# Altium footprint library Connectors.PcbLib: 113 footprints (part 5 of 8)
Each footprint in its own frame and in the unit in brackets; x right, y up, seen from the top. Pads: shape width x height; smd on the part's side, far side on the other; paste and mask are expansions set on the pad; w line width, h text height; cw(c..) or ccw(c..) is an arc to the next point about the centre after c.
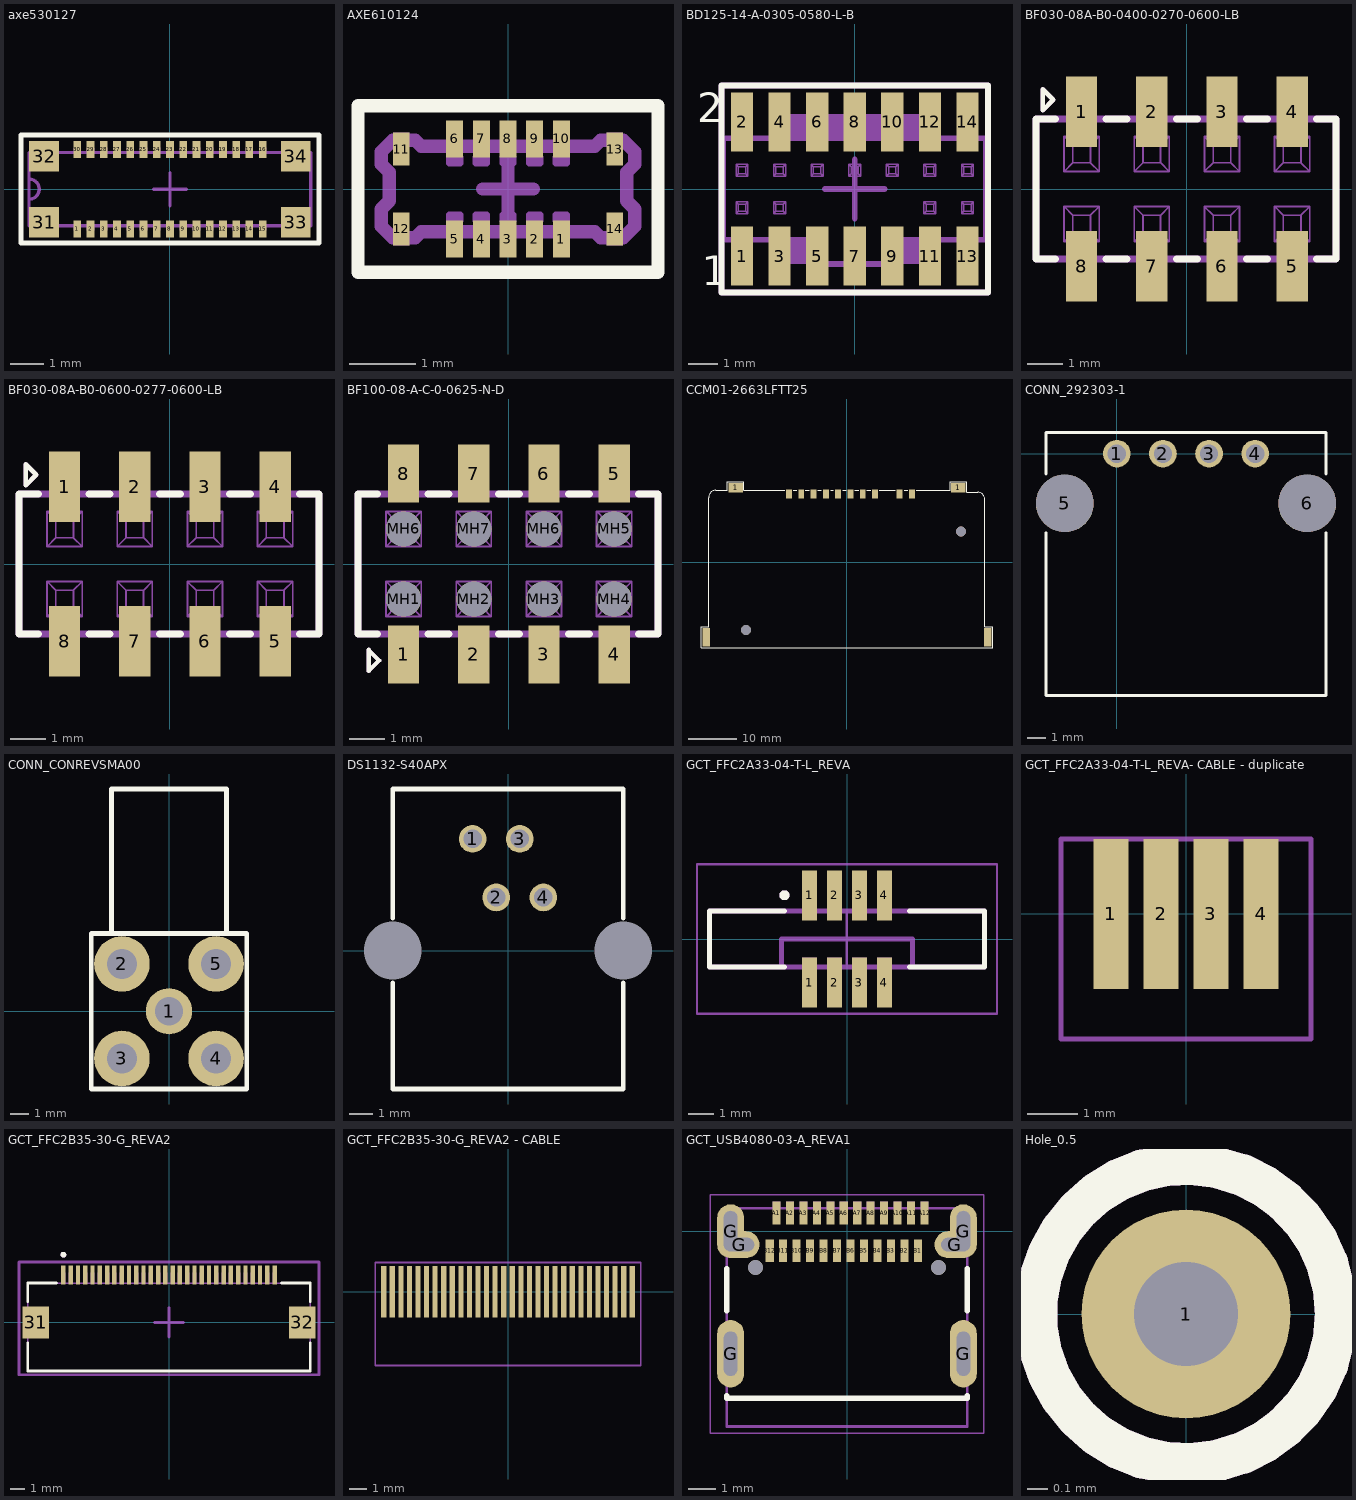
[diagram p4: the footprints below, top view; thin cyan lines are the x and y axes]

## axe530127 [mm]
pads (34):
  rect 0.229x0.508 smd paste+0 mask+0: 1(-2.8,-1.2) 2(-2.4,-1.2) 3(-2,-1.2) 4(-1.6,-1.2) 5(-1.2,-1.2) 6(-0.8,-1.2) 7(-0.4,-1.2) 8(0,-1.2) 9(0.4,-1.2) 10(0.8,-1.2) 11(1.2,-1.2) 12(1.6,-1.2) 13(2,-1.2) 14(2.4,-1.2) 15(2.8,-1.2) 16(2.8,1.2) 17(2.4,1.2) 18(2,1.2) 19(1.6,1.2) 20(1.2,1.2) 21(0.8,1.2) 22(0.4,1.2) 23(0,1.2) 24(-0.4,1.2) 25(-0.8,1.2) 26(-1.2,1.2) 27(-1.6,1.2) 28(-2,1.2) 29(-2.4,1.2) 30(-2.8,1.2)
  rect 0.9x0.92 smd: 31(-3.801,-0.994) 32(-3.801,0.994) 33(3.8,-0.994) 34(3.8,0.994)
Top Overlay:
  lines w0.15: -4.5,-1.624 4.5,-1.624 4.5,1.632 -4.5,1.632 -4.5,-1.624
Top Assembly:
  rectangle: -2.914,-1.251 -2.686,-1.105
  rectangle: -2.514,-1.251 -2.286,-1.105
  rectangle: -2.114,-1.251 -1.886,-1.105
  rectangle: -1.714,-1.251 -1.486,-1.105
  rectangle: -1.314,-1.251 -1.086,-1.105
  rectangle: -0.914,-1.251 -0.686,-1.105
  rectangle: -0.514,-1.251 -0.286,-1.105
  rectangle: -0.114,-1.251 0.114,-1.105
  rectangle: 0.286,-1.251 0.514,-1.105
  rectangle: 0.686,-1.251 0.914,-1.105
  rectangle: 1.086,-1.251 1.314,-1.105
  rectangle: 1.486,-1.251 1.714,-1.105
  rectangle: 1.886,-1.251 2.114,-1.105
  rectangle: 2.286,-1.251 2.514,-1.105
  rectangle: 2.686,-1.251 2.914,-1.105
  region: 2.914,1.251 2.686,1.251 2.686,1.105 2.914,1.105
  region: 2.514,1.251 2.286,1.251 2.286,1.105 2.514,1.105
  region: 2.114,1.251 1.886,1.251 1.886,1.105 2.114,1.105
  region: 1.714,1.251 1.486,1.251 1.486,1.105 1.714,1.105
  region: 1.314,1.251 1.086,1.251 1.086,1.105 1.314,1.105
  region: 0.914,1.251 0.686,1.251 0.686,1.105 0.914,1.105
  region: 0.514,1.251 0.286,1.251 0.286,1.105 0.514,1.105
  region: 0.114,1.251 -0.114,1.251 -0.114,1.105 0.114,1.105
  region: -0.286,1.251 -0.514,1.251 -0.514,1.105 -0.286,1.105
  region: -0.686,1.251 -0.914,1.251 -0.914,1.105 -0.686,1.105
  region: -1.086,1.251 -1.314,1.251 -1.314,1.105 -1.086,1.105
  region: -1.486,1.251 -1.714,1.251 -1.714,1.105 -1.486,1.105
  region: -1.886,1.251 -2.114,1.251 -2.114,1.105 -1.886,1.105
  region: -2.286,1.247 -2.515,1.247 -2.515,1.101 -2.286,1.101
  region: -2.686,1.251 -2.914,1.251 -2.914,1.105 -2.686,1.105
  region: -3.603,1.252 -3.915,1.252 -3.915,1.104 -3.603,1.104
  rectangle: -3.998,-1.252 -3.686,-1.104
  rectangle: 3.603,-1.252 3.915,-1.104
  region: 3.998,1.252 3.686,1.252 3.686,1.104 3.998,1.104
  lines w0.1: -4.255,-0.305 ccw(c-4.255,0) -4.255,0.305 ; -4.255,-1.105 -4.255,1.105 4.255,1.105 4.255,-1.105 -4.255,-1.105
  text ".Designator" at -2.499,-0.167 h0.5
Mechanical 15:
  lines w0.1: -0.5,0 0.5,0 ; 0,-0.5 0,0.5
3D body "axe530127.step": height 0.77, standoff 0, extent -4.25,-1.25 4.25,1.25
3D body: height 0.25, standoff 0, extent -0.254,0 0,0.254

## AXE610124 [mm]
pads (14):
  rect 0.254x0.55 smd paste+0 mask+0: 1(0.8,-0.75) 2(0.4,-0.75) 3(0,-0.75) 4(-0.4,-0.75) 5(-0.8,-0.75) 6(-0.8,0.75) 7(-0.4,0.75) 8(0,0.75) 9(0.4,0.75) 10(0.8,0.75)
  rect 0.25x0.5 smd: 11(-1.6,0.6) 12(-1.6,-0.6) 13(1.6,0.6) 14(1.6,-0.6)
Top Overlay:
  lines w0.2: -2.25,-1.25 2.25,-1.25 2.25,1.25 -2.25,1.25 -2.25,-1.25
Top Assembly:
  rectangle: -1.725,0.799 -1.475,0.85
  region: -1.475,-0.799 -1.725,-0.799 -1.725,-0.85 -1.475,-0.85
  region: 1.725,-0.799 1.475,-0.799 1.475,-0.85 1.725,-0.85
  rectangle: 1.475,0.799 1.725,0.85
  region: -0.726,-0.64 -0.881,-0.64 -0.881,-1 -0.726,-1
  region: -0.326,-0.64 -0.481,-0.64 -0.481,-1 -0.326,-1
  region: 0.074,-0.64 -0.081,-0.64 -0.081,-1 0.074,-1
  region: 0.474,-0.64 0.319,-0.64 0.319,-1 0.474,-1
  region: 0.874,-0.64 0.719,-0.64 0.719,-1 0.874,-1
  rectangle: 0.725,0.64 0.88,1
  rectangle: 0.325,0.64 0.48,1
  rectangle: -0.075,0.64 0.08,1
  rectangle: -0.475,0.64 -0.32,1
  rectangle: -0.875,0.64 -0.72,1
  lines w0.1: -0.88,-0.476 -0.88,-0.388 -0.72,-0.388 -0.72,-0.476 -0.88,-0.476 ; -0.88,0.388 -0.88,0.476 -0.72,0.476 -0.72,0.388 -0.88,0.388 ; -0.48,-0.476 -0.32,-0.476 -0.32,-0.388 -0.48,-0.388 -0.48,-0.476 ; -0.48,0.388 -0.48,0.476 -0.32,0.476 -0.32,0.388 -0.48,0.388 ; -0.08,-0.476 0.08,-0.476 0.08,-0.388 -0.08,-0.388 -0.08,-0.476 ; -0.08,0.388 0.08,0.388 0.08,0.476 -0.08,0.476 -0.08,0.388 ; 0.32,-0.476 0.32,-0.388 0.48,-0.388 0.48,-0.476 0.32,-0.476 ; 0.32,0.388 0.32,0.476 0.48,0.476 0.48,0.388 0.32,0.388 ; 0.72,-0.476 0.72,-0.388 0.88,-0.388 0.88,-0.476 0.72,-0.476 ; 0.72,0.388 0.72,0.476 0.88,0.476 0.88,0.388 0.72,0.388
  lines w0.2: -1.9,-0.56 -1.73,-0.73 -1.39,-0.73 -1.3,-0.64 1.3,-0.64 1.39,-0.73 1.73,-0.73 1.9,-0.56 1.9,-0.3 1.78,-0.18 1.78,0.25 1.9,0.37 1.9,0.56 1.73,0.73 1.39,0.73 1.3,0.64 -1.3,0.64 -1.39,0.73 -1.73,0.73 -1.9,0.56 -1.9,0.37 -1.78,0.25 -1.78,-0.18 -1.9,-0.3 -1.9,-0.56
  text ".Designator" at -1.749,-0.117 h0.35
Mechanical 15:
  lines w0.152: -2.25,1.241 -2.25,-1.25 2.25,-1.25 2.25,1.241 ; -2.25,1.25 2.25,1.25
  lines w0.2: -0.383,0 0.383,0 ; 0,-0.383 0,0.383
3D body "axe610124.stp": height 0.66, standoff 0.01, extent -1.9,-1 1.9,1

## BD125-14-A-0305-0580-L-B [mm]
pads (14):
  rect 0.75x2 smd: 1(-3.81,-2.27) 2(-3.81,2.27) 3(-2.54,-2.27) 4(-2.54,2.27) 5(-1.27,-2.27) 6(-1.27,2.27) 7(0,-2.27) 8(0,2.27) 9(1.27,-2.27) 10(1.27,2.27) 11(2.54,-2.27) 12(2.54,2.27) 13(3.81,-2.27) 14(3.81,2.27)
Top Overlay:
  lines w0.2: -4.5,-3.5 -4.5,3.5 4.5,3.5 4.5,-3.5 -4.5,-3.5
  text "1" at -5.167,-3.246 h1
  text "2" at -5.333,2.254 h1
Top Assembly:
  drawing of 158 lines, arcs and shapes, not listed
  text ".Designator" at -3.249,-0.717 h0.65
Mechanical 15:
  lines w0.2: -1,0 1,0 ; 0,-1 0,1 ; -4.5,-3.5 -4.5,3.5 4.5,3.5 4.5,-3.5 -4.5,-3.5
3D body "BD125-14-A-0305-0580-L-B v1.step": height 6.11, standoff -0.01, extent -4.445,-2.9 4.445,2.9

## BF030-08A-B0-0400-0270-0600-LB [mm]
pads (8):
  rect 0.89x2 smd: 1(-3,2.2) 2(-1,2.2) 3(1,2.2) 4(3,2.2) 5(3,-2.2) 6(1,-2.2) 7(-1,-2.2) 8(-3,-2.2)
Top Overlay:
  lines w0.127: -4.11,2.24 -3.81,2.54 -4.11,2.84 -4.11,2.24
  lines w0.2: -3.75,-2 -4.3,-2 -4.3,2 -3.75,2 ; -2.3,-2 -1.7,-2 ; -2.3,2 -1.7,2 ; -0.3,-2 0.3,-2 ; -0.3,2 0.3,2 ; 1.7,-2 2.3,-2 ; 1.7,2 2.3,2 ; 3.7,-2 4.25,-2 4.25,2 3.7,2
Top Assembly:
  region: 3.25,-2 2.75,-2 2.75,-3.125 3.25,-3.125
  region: 1.25,-2 0.75,-2 0.75,-3.125 1.25,-3.125
  region: -0.75,-2 -1.25,-2 -1.25,-3.125 -0.75,-3.125
  region: -2.75,-2 -3.25,-2 -3.25,-3.125 -2.75,-3.125
  rectangle: -3.25,2 -2.75,3.125
  rectangle: -1.25,2 -0.75,3.125
  rectangle: 0.75,2 1.25,3.125
  rectangle: 2.75,2 3.25,3.125
  lines w0.05: -3.5,-1.5 -3.25,-1.25 ; -3.5,-1.5 -2.5,-1.5 ; -3.5,-1.5 -3.5,-0.5 ; -3.5,-0.5 -3.25,-0.75 ; -3.5,-0.5 -2.5,-0.5 ; -3.5,0.5 -3.25,0.75 ; -3.5,0.5 -2.5,0.5 ; -3.5,0.5 -3.5,1.5 ; -3.5,1.5 -3.25,1.25 ; -3.5,1.5 -2.5,1.5 ; -3.25,-1.25 -2.75,-1.25 ; -3.25,-1.25 -3.25,-0.75 ; -3.25,-0.75 -2.75,-0.75 ; -3.25,0.75 -2.75,0.75 ; -3.25,0.75 -3.25,1.25 ; -3.25,1.25 -2.75,1.25 ; -2.75,-1.25 -2.75,-0.75 ; -2.75,-1.25 -2.5,-1.5 ; -2.75,-0.75 -2.5,-0.5 ; -2.75,0.75 -2.75,1.25 ; -2.75,0.75 -2.5,0.5 ; -2.75,1.25 -2.5,1.5 ; -2.5,0.5 -2.5,1.5 ; -2.5,-1.5 -2.5,-0.5 ; -1.5,-1.5 -1.25,-1.25 ; -1.5,-1.5 -0.5,-1.5 ; -1.5,-1.5 -1.5,-0.5 ; -1.5,-0.5 -1.25,-0.75 ; -1.5,-0.5 -0.5,-0.5 ; -1.5,0.5 -1.25,0.75 ; -1.5,0.5 -0.5,0.5 ; -1.5,0.5 -1.5,1.5 ; -1.5,1.5 -1.25,1.25 ; -1.5,1.5 -0.5,1.5 ; -1.25,-1.25 -0.75,-1.25 ; -1.25,-1.25 -1.25,-0.75 ; -1.25,-0.75 -0.75,-0.75 ; -1.25,0.75 -0.75,0.75 ; -1.25,0.75 -1.25,1.25 ; -1.25,1.25 -0.75,1.25 ; -0.75,-1.25 -0.75,-0.75 ; -0.75,-1.25 -0.5,-1.5 ; -0.75,-0.75 -0.5,-0.5 ; -0.75,0.75 -0.75,1.25 ; -0.75,0.75 -0.5,0.5 ; -0.75,1.25 -0.5,1.5 ; -0.5,-1.5 -0.5,-0.5 ; -0.5,0.5 -0.5,1.5 ; 0.5,-1.5 0.75,-1.25 ; 0.5,-1.5 1.5,-1.5 ; 0.5,-1.5 0.5,-0.5 ; 0.5,-0.5 0.75,-0.75 ; 0.5,-0.5 1.5,-0.5 ; 0.5,0.5 0.75,0.75 ; 0.5,0.5 1.5,0.5 ; 0.5,0.5 0.5,1.5 ; 0.5,1.5 0.75,1.25 ; 0.5,1.5 1.5,1.5 ; 0.75,-1.25 1.25,-1.25 ; 0.75,-1.25 0.75,-0.75 ; 0.75,-0.75 1.25,-0.75 ; 0.75,0.75 1.25,0.75 ; 0.75,0.75 0.75,1.25 ; 0.75,1.25 1.25,1.25 ; 1.25,-1.25 1.25,-0.75 ; 1.25,-1.25 1.5,-1.5 ; 1.25,-0.75 1.5,-0.5 ; 1.25,0.75 1.25,1.25 ; 1.25,0.75 1.5,0.5 ; 1.25,1.25 1.5,1.5 ; 1.5,-1.5 1.5,-0.5 ; 1.5,0.5 1.5,1.5 ; 2.5,0.5 2.75,0.75 ; 2.5,0.5 3.5,0.5 ; 2.5,0.5 2.5,1.5 ; 2.5,1.5 2.75,1.25 ; 2.5,1.5 3.5,1.5 ; 2.5,-1.5 2.75,-1.25 ; 2.5,-1.5 3.5,-1.5 ; 2.5,-1.5 2.5,-0.5 ; 2.5,-0.5 2.75,-0.75 ; 2.5,-0.5 3.5,-0.5 ; 2.75,-1.25 3.25,-1.25 ; 2.75,-1.25 2.75,-0.75 ; 2.75,-0.75 3.25,-0.75 ; 2.75,0.75 3.25,0.75 ; 2.75,0.75 2.75,1.25 ; 2.75,1.25 3.25,1.25 ; 3.25,-1.25 3.25,-0.75 ; 3.25,-1.25 3.5,-1.5 ; 3.25,-0.75 3.5,-0.5 ; 3.25,0.75 3.25,1.25 ; 3.25,0.75 3.5,0.5 ; 3.25,1.25 3.5,1.5 ; 3.5,-1.5 3.5,-0.5 ; 3.5,0.5 3.5,1.5
  lines w0.127: -4.11,2.24 -3.81,2.54 -4.11,2.84 -4.11,2.24
  lines w0.2: -4.3,-2 -4.3,2 4.25,2 4.25,-2 -4.3,-2
  text ".Designator" at -3.749,-0.25 h0.75
3D body "BF030-08A-B0-0400-0270-0600-LB v1.step": height 6.7, standoff 0, extent -4.1,-3 4.1,3

## BF030-08A-B0-0600-0277-0600-LB [mm]
pads (8):
  rect 0.89x2 smd: 1(-3,2.2) 2(-1,2.2) 3(1,2.2) 4(3,2.2) 5(3,-2.2) 6(1,-2.2) 7(-1,-2.2) 8(-3,-2.2)
Top Overlay:
  lines w0.127: -4.11,2.24 -3.81,2.54 -4.11,2.84 -4.11,2.24
  lines w0.2: -3.75,-2 -4.3,-2 -4.3,2 -3.75,2 ; -2.3,-2 -1.7,-2 ; -2.3,2 -1.7,2 ; -0.3,-2 0.3,-2 ; -0.3,2 0.3,2 ; 1.7,-2 2.3,-2 ; 1.7,2 2.3,2 ; 3.7,-2 4.25,-2 4.25,2 3.7,2
Top Assembly:
  region: 3.25,-2 2.75,-2 2.75,-3.125 3.25,-3.125
  region: 1.25,-2 0.75,-2 0.75,-3.125 1.25,-3.125
  region: -0.75,-2 -1.25,-2 -1.25,-3.125 -0.75,-3.125
  region: -2.75,-2 -3.25,-2 -3.25,-3.125 -2.75,-3.125
  rectangle: -3.25,2 -2.75,3.125
  rectangle: -1.25,2 -0.75,3.125
  rectangle: 0.75,2 1.25,3.125
  rectangle: 2.75,2 3.25,3.125
  lines w0.05: -3.5,-1.5 -3.25,-1.25 ; -3.5,-1.5 -2.5,-1.5 ; -3.5,-1.5 -3.5,-0.5 ; -3.5,-0.5 -3.25,-0.75 ; -3.5,-0.5 -2.5,-0.5 ; -3.5,0.5 -3.25,0.75 ; -3.5,0.5 -2.5,0.5 ; -3.5,0.5 -3.5,1.5 ; -3.5,1.5 -3.25,1.25 ; -3.5,1.5 -2.5,1.5 ; -3.25,-1.25 -2.75,-1.25 ; -3.25,-1.25 -3.25,-0.75 ; -3.25,-0.75 -2.75,-0.75 ; -3.25,0.75 -2.75,0.75 ; -3.25,0.75 -3.25,1.25 ; -3.25,1.25 -2.75,1.25 ; -2.75,-1.25 -2.75,-0.75 ; -2.75,-1.25 -2.5,-1.5 ; -2.75,-0.75 -2.5,-0.5 ; -2.75,0.75 -2.75,1.25 ; -2.75,0.75 -2.5,0.5 ; -2.75,1.25 -2.5,1.5 ; -2.5,0.5 -2.5,1.5 ; -2.5,-1.5 -2.5,-0.5 ; -1.5,-1.5 -1.25,-1.25 ; -1.5,-1.5 -0.5,-1.5 ; -1.5,-1.5 -1.5,-0.5 ; -1.5,-0.5 -1.25,-0.75 ; -1.5,-0.5 -0.5,-0.5 ; -1.5,0.5 -1.25,0.75 ; -1.5,0.5 -0.5,0.5 ; -1.5,0.5 -1.5,1.5 ; -1.5,1.5 -1.25,1.25 ; -1.5,1.5 -0.5,1.5 ; -1.25,-1.25 -0.75,-1.25 ; -1.25,-1.25 -1.25,-0.75 ; -1.25,-0.75 -0.75,-0.75 ; -1.25,0.75 -0.75,0.75 ; -1.25,0.75 -1.25,1.25 ; -1.25,1.25 -0.75,1.25 ; -0.75,-1.25 -0.75,-0.75 ; -0.75,-1.25 -0.5,-1.5 ; -0.75,-0.75 -0.5,-0.5 ; -0.75,0.75 -0.75,1.25 ; -0.75,0.75 -0.5,0.5 ; -0.75,1.25 -0.5,1.5 ; -0.5,-1.5 -0.5,-0.5 ; -0.5,0.5 -0.5,1.5 ; 0.5,-1.5 0.75,-1.25 ; 0.5,-1.5 1.5,-1.5 ; 0.5,-1.5 0.5,-0.5 ; 0.5,-0.5 0.75,-0.75 ; 0.5,-0.5 1.5,-0.5 ; 0.5,0.5 0.75,0.75 ; 0.5,0.5 1.5,0.5 ; 0.5,0.5 0.5,1.5 ; 0.5,1.5 0.75,1.25 ; 0.5,1.5 1.5,1.5 ; 0.75,-1.25 1.25,-1.25 ; 0.75,-1.25 0.75,-0.75 ; 0.75,-0.75 1.25,-0.75 ; 0.75,0.75 1.25,0.75 ; 0.75,0.75 0.75,1.25 ; 0.75,1.25 1.25,1.25 ; 1.25,-1.25 1.25,-0.75 ; 1.25,-1.25 1.5,-1.5 ; 1.25,-0.75 1.5,-0.5 ; 1.25,0.75 1.25,1.25 ; 1.25,0.75 1.5,0.5 ; 1.25,1.25 1.5,1.5 ; 1.5,-1.5 1.5,-0.5 ; 1.5,0.5 1.5,1.5 ; 2.5,0.5 2.75,0.75 ; 2.5,0.5 3.5,0.5 ; 2.5,0.5 2.5,1.5 ; 2.5,1.5 2.75,1.25 ; 2.5,1.5 3.5,1.5 ; 2.5,-1.5 2.75,-1.25 ; 2.5,-1.5 3.5,-1.5 ; 2.5,-1.5 2.5,-0.5 ; 2.5,-0.5 2.75,-0.75 ; 2.5,-0.5 3.5,-0.5 ; 2.75,-1.25 3.25,-1.25 ; 2.75,-1.25 2.75,-0.75 ; 2.75,-0.75 3.25,-0.75 ; 2.75,0.75 3.25,0.75 ; 2.75,0.75 2.75,1.25 ; 2.75,1.25 3.25,1.25 ; 3.25,-1.25 3.25,-0.75 ; 3.25,-1.25 3.5,-1.5 ; 3.25,-0.75 3.5,-0.5 ; 3.25,0.75 3.25,1.25 ; 3.25,0.75 3.5,0.5 ; 3.25,1.25 3.5,1.5 ; 3.5,-1.5 3.5,-0.5 ; 3.5,0.5 3.5,1.5
  lines w0.127: -4.11,2.24 -3.81,2.54 -4.11,2.84 -4.11,2.24
  lines w0.2: -4.3,-2 -4.3,2 4.25,2 4.25,-2 -4.3,-2
  text ".Designator" at -3.749,-0.25 h0.75
3D body "BF030-08A-B0-0600-0277-0600-LB.stp": height 8.78, standoff 0.01, extent -4.1,-3 4.1,3

## BF100-08-A-C-0-0625-N-D [mm]
pads (16):
  rect 0.89x1.65 smd: 1(-3,-2.575) 2(-1,-2.575) 3(1,-2.575) 4(3,-2.575) 5(3,2.575) 6(1,2.575) 7(-1,2.575) 8(-3,2.575)
  round 1 hole 1 unplated: MH1(-3,-1) MH2(-1,-1) MH3(1,-1) MH4(3,-1) MH5(3,1) MH6(-3,1) MH6(1,1) MH7(-1,1)
Top Overlay:
  lines w0.127: -4,-3.05 -4,-2.45 -3.7,-2.75 -4,-3.05
  lines w0.2: -3.75,-2 -4.3,-2 -4.3,2 -3.75,2 ; -2.3,-2 -1.7,-2 ; -2.3,2 -1.7,2 ; -0.3,-2 0.3,-2 ; -0.3,2 0.3,2 ; 1.7,-2 2.3,-2 ; 1.7,2 2.3,2 ; 3.7,-2 4.25,-2 4.25,2 3.7,2
Top Assembly:
  rectangle: 2.75,2 3.25,3.125
  rectangle: 0.75,2 1.25,3.125
  rectangle: -1.25,2 -0.75,3.125
  rectangle: -3.25,2 -2.75,3.125
  region: -2.75,-2 -3.25,-2 -3.25,-3.125 -2.75,-3.125
  region: -0.75,-2 -1.25,-2 -1.25,-3.125 -0.75,-3.125
  region: 1.25,-2 0.75,-2 0.75,-3.125 1.25,-3.125
  region: 3.25,-2 2.75,-2 2.75,-3.125 3.25,-3.125
  lines w0.05: -3.5,-1.5 -3.5,-0.5 ; -3.5,-1.5 -2.5,-1.5 ; -3.5,-1.5 -3.25,-1.25 ; -3.5,-0.5 -2.5,-0.5 ; -3.5,-0.5 -3.25,-0.75 ; -3.5,0.5 -3.5,1.5 ; -3.5,0.5 -2.5,0.5 ; -3.5,0.5 -3.25,0.75 ; -3.5,1.5 -2.5,1.5 ; -3.5,1.5 -3.25,1.25 ; -3.25,-1.25 -3.25,-0.75 ; -3.25,-1.25 -2.75,-1.25 ; -3.25,-0.75 -2.75,-0.75 ; -3.25,0.75 -3.25,1.25 ; -3.25,0.75 -2.75,0.75 ; -3.25,1.25 -2.75,1.25 ; -2.75,-1.25 -2.5,-1.5 ; -2.75,-1.25 -2.75,-0.75 ; -2.75,-0.75 -2.5,-0.5 ; -2.75,0.75 -2.5,0.5 ; -2.75,0.75 -2.75,1.25 ; -2.75,1.25 -2.5,1.5 ; -2.5,0.5 -2.5,1.5 ; -2.5,-1.5 -2.5,-0.5 ; -1.5,-1.5 -1.5,-0.5 ; -1.5,-1.5 -0.5,-1.5 ; -1.5,-1.5 -1.25,-1.25 ; -1.5,-0.5 -0.5,-0.5 ; -1.5,-0.5 -1.25,-0.75 ; -1.5,0.5 -1.5,1.5 ; -1.5,0.5 -0.5,0.5 ; -1.5,0.5 -1.25,0.75 ; -1.5,1.5 -0.5,1.5 ; -1.5,1.5 -1.25,1.25 ; -1.25,-1.25 -1.25,-0.75 ; -1.25,-1.25 -0.75,-1.25 ; -1.25,-0.75 -0.75,-0.75 ; -1.25,0.75 -1.25,1.25 ; -1.25,0.75 -0.75,0.75 ; -1.25,1.25 -0.75,1.25 ; -0.75,-1.25 -0.5,-1.5 ; -0.75,-1.25 -0.75,-0.75 ; -0.75,-0.75 -0.5,-0.5 ; -0.75,0.75 -0.5,0.5 ; -0.75,0.75 -0.75,1.25 ; -0.75,1.25 -0.5,1.5 ; -0.5,-1.5 -0.5,-0.5 ; -0.5,0.5 -0.5,1.5 ; 0.5,-1.5 0.5,-0.5 ; 0.5,-1.5 1.5,-1.5 ; 0.5,-1.5 0.75,-1.25 ; 0.5,-0.5 1.5,-0.5 ; 0.5,-0.5 0.75,-0.75 ; 0.5,0.5 0.5,1.5 ; 0.5,0.5 1.5,0.5 ; 0.5,0.5 0.75,0.75 ; 0.5,1.5 1.5,1.5 ; 0.5,1.5 0.75,1.25 ; 0.75,-1.25 0.75,-0.75 ; 0.75,-1.25 1.25,-1.25 ; 0.75,-0.75 1.25,-0.75 ; 0.75,0.75 1.25,0.75 ; 0.75,0.75 0.75,1.25 ; 0.75,1.25 1.25,1.25 ; 1.25,-1.25 1.5,-1.5 ; 1.25,-1.25 1.25,-0.75 ; 1.25,-0.75 1.5,-0.5 ; 1.25,0.75 1.25,1.25 ; 1.25,0.75 1.5,0.5 ; 1.25,1.25 1.5,1.5 ; 1.5,-1.5 1.5,-0.5 ; 1.5,0.5 1.5,1.5 ; 2.5,0.5 2.5,1.5 ; 2.5,0.5 3.5,0.5 ; 2.5,0.5 2.75,0.75 ; 2.5,1.5 3.5,1.5 ; 2.5,1.5 2.75,1.25 ; 2.5,-1.5 2.5,-0.5 ; 2.5,-1.5 3.5,-1.5 ; 2.5,-1.5 2.75,-1.25 ; 2.5,-0.5 3.5,-0.5 ; 2.5,-0.5 2.75,-0.75 ; 2.75,-1.25 2.75,-0.75 ; 2.75,-1.25 3.25,-1.25 ; 2.75,-0.75 3.25,-0.75 ; 2.75,0.75 2.75,1.25 ; 2.75,0.75 3.25,0.75 ; 2.75,1.25 3.25,1.25 ; 3.25,-1.25 3.5,-1.5 ; 3.25,-1.25 3.25,-0.75 ; 3.25,-0.75 3.5,-0.5 ; 3.25,0.75 3.5,0.5 ; 3.25,0.75 3.25,1.25 ; 3.25,1.25 3.5,1.5 ; 3.5,-1.5 3.5,-0.5 ; 3.5,0.5 3.5,1.5
  lines w0.127: -4,-3.05 -4,-2.45 -3.7,-2.75 -4,-3.05
  lines w0.2: -4.3,-2 4.25,-2 4.25,2 -4.3,2 -4.3,-2
  text ".Designator" at -2.499,-0.167 h0.5
3D body "BF100-08-A-C-0-0625-N-C v1.step": height 4.3, standoff 0, extent -4.3,-3.125 4.3,3.125

## CCM01-2663LFTT25 [mm]
pads (14):
  rect 1.5x3.8 smd: 1(-29.09,-15.458) 1(29.09,-15.458)
  rect 3x2 smd: 1(-23,15.458) 1(23,15.458)
  rect 1.2x1.85 smd: C1(-6.91,14.187) C2(-4.37,14.187) C3(-1.83,14.187) C4(0.711,14.186) C5(-11.991,14.186) C6(-9.449,14.186) C7(3.249,14.186) C8(5.79,14.187) SW1(10.87,14.142) SW2(13.409,14.143)
via -20.88,-13.918 diameter 2.05 hole 2.05
via 23.57,6.402 diameter 2.05 hole 2.05
Top Overlay:
  lines w0.2: -12.9,14.9 -21.3,14.9 -21.3,16.7 -21.7,16.7 -24.7,16.7 -24.7,14.9 -27.1,14.9 ccw(c-27.1,13.4) -28.6,13.4 -28.6,-13.3 -30.1,-13.3 -30.1,-17.6 30.1,-17.6 30.1,-13.3 28.5,-13.3 28.5,13 ccw(c27,13) 27,14.5 24.7,14.5 24.7,16.7 21.3,16.7 21.3,14.9 14.3,14.9 ; -11.1,14.9 -10.4,14.9 ; -8.6,14.9 -7.8,14.9 ; -6,14.9 -5.3,14.9 ; -3.4,14.9 -2.8,14.9 ; -0.9,14.9 -0.2,14.9 ; 1.6,14.9 2.4,14.9 ; 4.1,14.9 4.9,14.9 ; 6.7,14.9 10,14.9 ; 11.8,14.9 12.5,14.9
3D body "CCM01-2663 LFT T25.stp": height 3.36, standoff -0.8, extent -29.667,-17.393 29.667,16.064

## CONN_292303-1 [mil]
pads (6):
  round 59 hole 39 mask+0: 1(0,0) 2(98.43,0) 3(196.85,0) 4(295.28,0)
  round 123 hole 123: 5(-111.02,-106) 6(406.3,-106)
Top Overlay:
  lines w6: -151.36,-168.75 -151.36,-516 446.64,-516 446.64,-168.75 ; -151.36,-43.25 -151.36,45 446.64,45 446.64,-43.25
3D body: height 10, standoff 0, extent 0,0 10,10
3D body "TypeA.stp": height 305.89, standoff -141.61, extent -173.84,-515.75 465.22,35.43

## CONN_CONREVSMA00 [mm]
pads (5):
  round 2.5 / inner round 2.032 / far side round 2.032 hole 1.524 mask+0: 1(0,0)
  round 3 / inner round 2.134 / far side round 2.134 hole 1.626 mask+0: 2(-2.54,2.553) 3(-2.54,-2.553) 4(2.54,-2.553) 5(2.54,2.553)
Top Overlay:
  lines w0.254: -3.1,4.2 -3.1,12 3.1,12 3.1,4.2 ; -4.2,-4.2 -4.2,4.2 4.2,4.2 4.2,-4.2 -4.2,-4.2
3D body: height 0.25, standoff 0, extent 0,0 0.254,0.254
3D body "SMA-angled.STEP": height 9.91, standoff -3.89, extent -3.5,-3.5 3.5,11

## DS1132-S40APX [mm]
height 14.5
pads (6):
  round 1.2 hole 0.8: 1(-1.53,4.84) 2(-0.51,2.3) 3(0.51,4.84) 4(1.53,2.3)
  round 0 hole 2.5: 5(-5,0) 6(5,0)
Top Overlay:
  lines w0.2: -5,-1.4 -5,-6 5,-6 5,-1.4 ; -5,1.4 -5,7 5,7 5,1.4
3D body "4P4C.stp": height 14.51, standoff -3.44, extent -6.23,-6 6.231,7

## GCT_FFC2A33-04-T-L_REVA [mm]
pads (8):
  rect 0.6x2 smd: 1(-1.5,-1.75) 1(-1.5,1.75) 2(-0.5,-1.75) 2(-0.5,1.75) 3(0.5,-1.75) 3(0.5,1.75) 4(1.5,-1.75) 4(1.5,1.75)
Top Overlay:
  circle w0.2: c-2.5,1.75 r0.1
  lines w0.2: -2.5,-1.125 -5.5,-1.125 -5.5,1.125 -2.5,1.125 ; 2.5,-1.125 5.5,-1.125 5.5,1.125 2.5,1.125
Top Assembly:
  circle w0.2: c-2.5,1.75 r0.1
  rectangle: 1.2,-1.096 1.8,-0.75
  rectangle: 0.2,-1.096 0.8,-0.75
  rectangle: -0.8,-1.096 -0.2,-0.75
  rectangle: -1.8,-1.096 -1.2,-0.75
  rectangle: 1.378,-2.34 1.625,-1.125
  rectangle: 0.378,-2.34 0.625,-1.125
  rectangle: -0.622,-2.34 -0.375,-1.125
  rectangle: -1.622,-2.34 -1.375,-1.125
  region: -1.378,2.34 -1.625,2.34 -1.625,1.125 -1.378,1.125
  region: -0.378,2.34 -0.625,2.34 -0.625,1.125 -0.378,1.125
  region: 0.622,2.34 0.375,2.34 0.375,1.125 0.622,1.125
  region: 1.622,2.34 1.375,2.34 1.375,1.125 1.622,1.125
  lines w0.2: -2.615,-1.115 -2.615,0 0,0 2.615,0 2.615,-1.115 ; -5.5,-1.125 5.5,-1.125 5.5,1.125 -5.5,1.125 -5.5,-1.125
  text ".Designator" at -2.499,0.387 h0.5
Mechanical 15:
  lines w0.1: -1.125,0 1.125,0 ; 0,-1.125 0,1.125 ; -6,-3 6,-3 6,3 -6,3 -6,2.5 -6,-3
3D body "FFC3A20-04-G.stp": height 5.51, standoff 0.01, extent -5.5,-2.34 5.5,2.16

## GCT_FFC2A33-04-T-L_REVA- CABLE - duplicate [mm]
pads (4):
  rect 0.7x3 smd: 1(-1.5,0) 2(-0.5,0) 3(0.5,0) 4(1.5,0)
Top Assembly:
  lines w0.1: -2.5,-2.5 2.5,-2.5 2.5,1.5 -2.5,1.5 -2.5,-2.5

## GCT_FFC2B35-30-G_REVA2 [mm]
pads (32):
  rect 0.3x1.3 smd: 1(-7.25,3.25) 2(-6.75,3.25) 3(-6.25,3.25) 4(-5.75,3.25) 5(-5.25,3.25) 6(-4.75,3.25) 7(-4.25,3.25) 8(-3.75,3.25) 9(-3.25,3.25) 10(-2.75,3.25) 11(-2.25,3.25) 12(-1.75,3.25) 13(-1.25,3.25) 14(-0.75,3.25) 15(-0.25,3.25) 16(0.25,3.25) 17(0.75,3.25) 18(1.25,3.25) 19(1.75,3.25) 20(2.25,3.25) 21(2.75,3.25) 22(3.25,3.25) 23(3.75,3.25) 24(4.25,3.25) 25(4.75,3.25) 26(5.25,3.25) 27(5.75,3.25) 28(6.25,3.25) 29(6.75,3.25) 30(7.25,3.25)
  rect 1.8x2.2 smd: 31(-9.15,0) 32(9.15,0)
Top Overlay:
  circle w0.2: c-7.25,4.646 r0.1
  lines w0.2: -9.7,-1.42 -9.7,-3.35 9.7,-3.35 9.7,-1.42 ; -9.7,1.42 -9.7,2.7 -7.72,2.7 ; 7.72,2.7 9.7,2.7 9.7,1.42
Top Assembly:
  circle w0.2: c-7.25,4.646 r0.1
  rectangle: -7.4,2.7 -7.1,3.427
  rectangle: -6.9,2.7 -6.6,3.427
  rectangle: -6.4,2.7 -6.1,3.427
  rectangle: -5.9,2.7 -5.6,3.427
  rectangle: -5.4,2.7 -5.1,3.427
  rectangle: -4.9,2.7 -4.6,3.427
  rectangle: -4.4,2.7 -4.1,3.427
  rectangle: -3.9,2.7 -3.6,3.427
  rectangle: -3.4,2.7 -3.1,3.427
  rectangle: -2.9,2.7 -2.6,3.427
  rectangle: -2.4,2.7 -2.1,3.427
  rectangle: -1.9,2.7 -1.6,3.427
  rectangle: -1.4,2.7 -1.1,3.427
  rectangle: -0.9,2.7 -0.6,3.427
  rectangle: -0.4,2.7 -0.1,3.427
  rectangle: 0.1,2.7 0.4,3.427
  rectangle: 0.6,2.7 0.9,3.427
  rectangle: 1.1,2.7 1.4,3.427
  rectangle: 1.6,2.7 1.9,3.427
  rectangle: 2.1,2.7 2.4,3.427
  rectangle: 2.6,2.7 2.9,3.427
  rectangle: 3.1,2.7 3.4,3.427
  rectangle: 3.6,2.7 3.9,3.427
  rectangle: 4.1,2.7 4.4,3.427
  rectangle: 4.6,2.7 4.9,3.427
  rectangle: 5.1,2.7 5.4,3.427
  rectangle: 5.6,2.7 5.9,3.427
  rectangle: 6.1,2.7 6.4,3.427
  rectangle: 6.6,2.7 6.9,3.427
  rectangle: 7.1,2.7 7.4,3.427
  lines w0.1: -9.7,-3.35 -9.7,2.7 9.7,2.7 9.7,-3.35 -9.7,-3.35
  text ".Designator" at -4.998,-0.333 h1
Mechanical 15:
  lines w0.2: -1,0 1,0 ; 0,-1 0,1 ; -10.3,-3.6 10.3,-3.6 10.3,4.15 -10.3,4.15 -10.3,-3.6
3D body "FFC2B35-30-T.stp": height 1.97, standoff -0.03, extent -9.7,-3.345 9.7,3.415

## GCT_FFC2B35-30-G_REVA2 - CABLE [mm]
pads (30):
  rect 0.3x3 smd: 1(-7.25,0) 2(-6.75,0) 3(-6.25,0) 4(-5.75,0) 5(-5.25,0) 6(-4.75,0) 7(-4.25,0) 8(-3.75,0) 9(-3.25,0) 10(-2.75,0) 11(-2.25,0) 12(-1.75,0) 13(-1.25,0) 14(-0.75,0) 15(-0.25,0) 16(0.25,0) 17(0.75,0) 18(1.25,0) 19(1.75,0) 20(2.25,0) 21(2.75,0) 22(3.25,0) 23(3.75,0) 24(4.25,0) 25(4.75,0) 26(5.25,0) 27(5.75,0) 28(6.25,0) 29(6.75,0) 30(7.25,0)
Top Assembly:
  lines w0.1: -7.75,-4.3 -7.75,1.7 7.75,1.7 7.75,-4.3 -7.75,-4.3

## GCT_USB4080-03-A_REVA1 [mm]
height 3.16
pads (32):
  rect 0.3x0.85 smd: A1(-2.62,0.675) A2(-2.12,0.675) A3(-1.62,0.675) A4(-1.12,0.675) A5(-0.62,0.675) A6(-0.12,0.675) A7(0.38,0.675) A8(0.88,0.675) A9(1.38,0.675) A10(1.88,0.675) A11(2.38,0.675) A12(2.88,0.675) B1(2.63,-0.725) B2(2.13,-0.725) B3(1.63,-0.725) B4(1.13,-0.725) B5(0.63,-0.725) B6(0.13,-0.725) B7(-0.37,-0.725) B8(-0.87,-0.725) B9(-1.37,-0.725) B10(-1.87,-0.725) B11(-2.37,-0.725) B12(-2.87,-0.725)
  oval 1x2.5 hole 0.5 slot 1.65 at 90 deg mask+0: G(-4.32,-4.55) G(4.32,-4.55)
  oval 1x2 hole 0.5 slot 1.5 at 90 deg mask+0: G(-4.32,0) G(4.32,0)
  oval 1.5x1 hole 0.5 slot 1.1 at 0 deg mask+0: G(-4,-0.5)
  oval 1.5x1 hole 0.5 slot 1 at 0 deg mask+0: G(4,-0.5)
  round 0.55 hole 0.55 unplated: ""(-3.4,-1.35) ""(3.4,-1.35)
Top Overlay:
  lines w0.2: -4.47,-6.1 -4.47,-6.2 4.47,-6.2 4.47,-6.1 ; -4.47,-2.95 -4.47,-1.4 ; 4.47,-2.95 4.47,-1.4
Top Assembly:
  rectangle: -2.77,0.897 -2.47,1.1
  rectangle: -2.27,0.897 -1.97,1.1
  rectangle: -1.77,0.897 -1.47,1.1
  rectangle: -1.27,0.897 -0.97,1.1
  rectangle: -0.77,0.897 -0.47,1.1
  rectangle: -0.27,0.897 0.03,1.1
  rectangle: 0.23,0.897 0.53,1.1
  rectangle: 0.73,0.897 1.03,1.1
  rectangle: 1.23,0.897 1.53,1.1
  rectangle: 1.73,0.897 2.03,1.1
  rectangle: 2.23,0.897 2.53,1.1
  rectangle: 2.73,0.897 3.03,1.1
  lines w0.1: -4.47,-6.2 -4.47,0.857 4.47,0.857 4.47,-6.2 ; -4.47,-6.2 -4.47,-7.25 4.47,-7.25 4.47,-6.2 ; -4.47,-6.2 4.47,-6.2
  text ".Designator" at -4.968,-2.833 h1
Mechanical 15:
  lines w0.05: -5.07,-7.5 -5.07,1.35 5.07,1.35 5.07,-7.5 -5.07,-7.5
3D body "USB4080-03-A.stp": height 3.23, standoff -0.53, extent -4.47,-7.25 4.47,0.85

## Hole_0.5 [mm]
pads (1):
  round 1 hole 0.5: 1(0,0)
Top Overlay:
  circle w0.2: c0,0 r0.718
Top Assembly:
  circle w0.2: c0,0 r0.718
  text ".Designator" at -1.749,-0.117 h0.35